# Altium footprint library FootPrintLib_1.PcbLib: 498 footprints (part 21 of 35)
Each footprint in its own frame and in the unit in brackets; x right, y up, seen from the top. Pads: shape width x height; smd on the part's side, far side on the other; paste and mask are expansions set on the pad; w line width, h text height; cw(c..) or ccw(c..) is an arc to the next point about the centre after c.
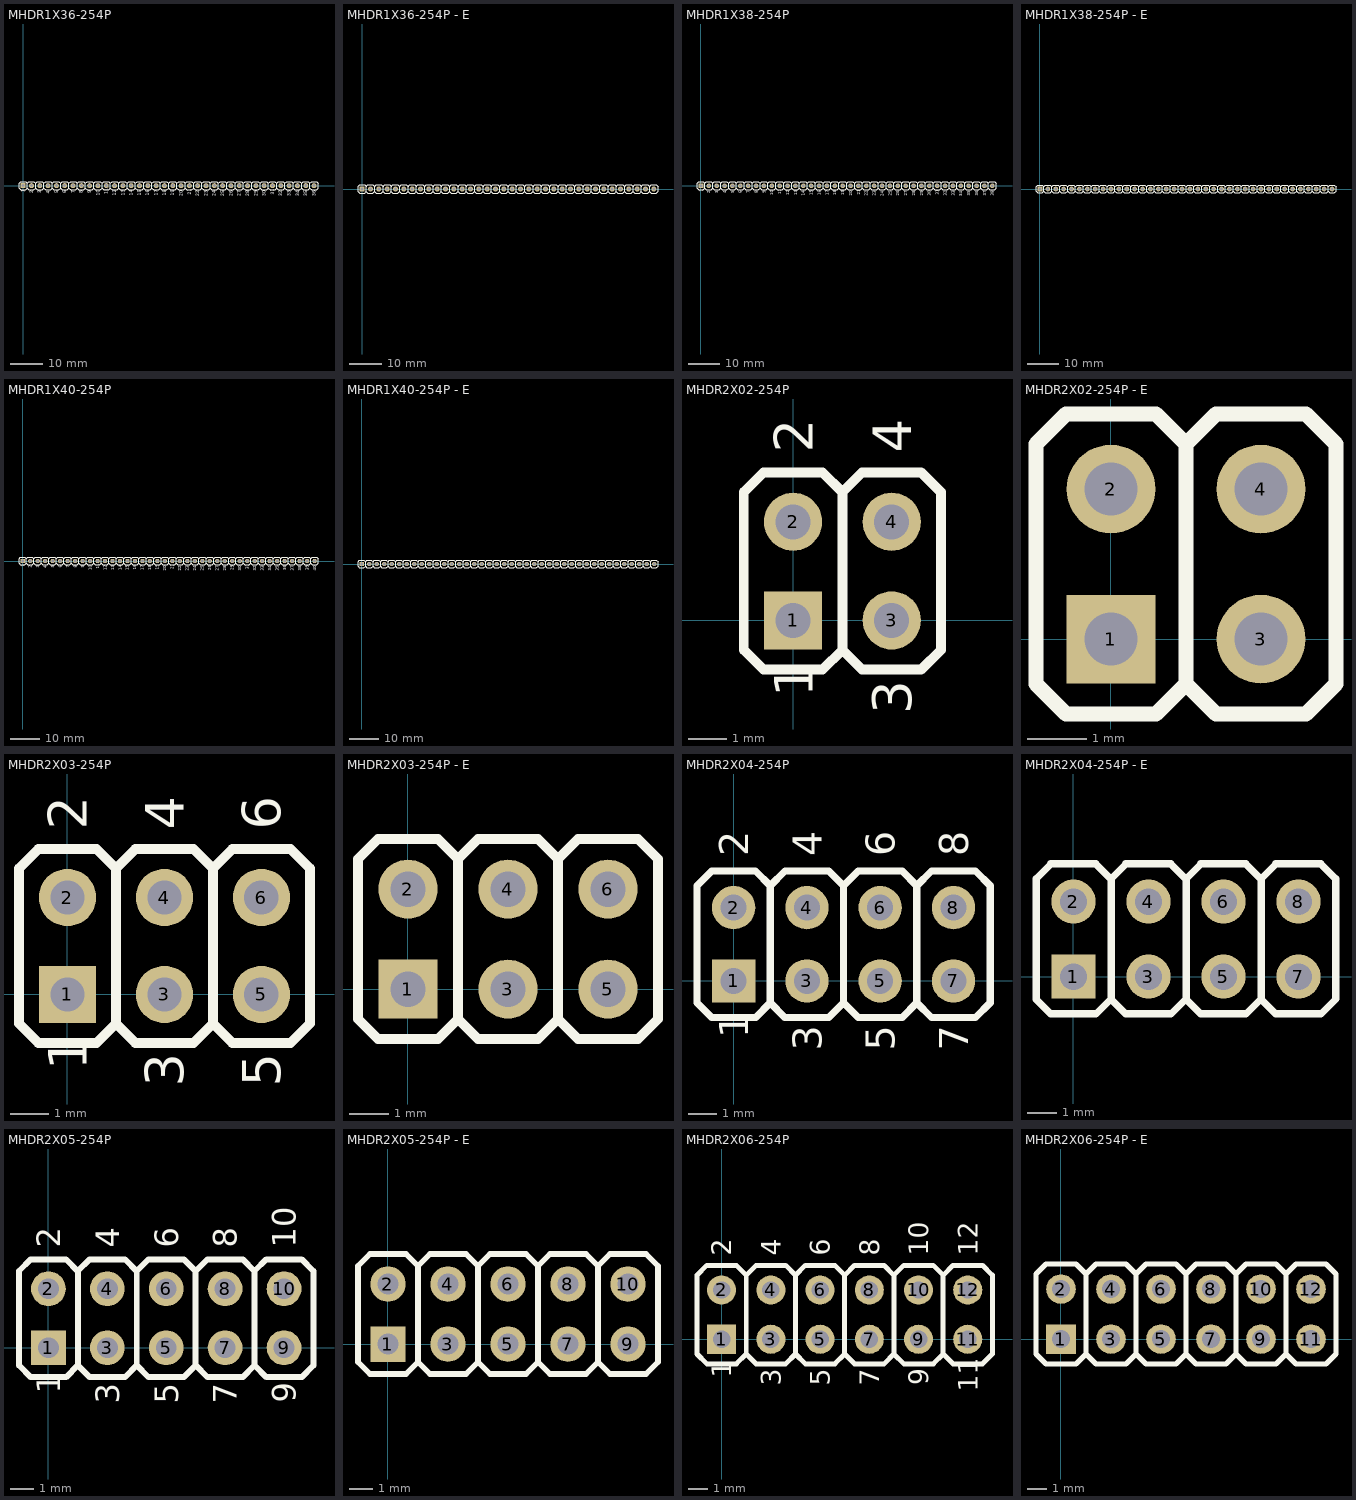
[diagram p20: the footprints below, top view; thin cyan lines are the x and y axes]

## MHDR1X36-254P [mm] "Male Header 1X36 with 2.54 mm Pitch"
pads (36):
  rect 1.5x1.5 hole 0.9: 1(0,0)
  round 1.5 hole 0.9: 2(2.54,0) 3(5.08,0) 4(7.62,0) 5(10.16,0) 6(12.7,0) 7(15.24,0) 8(17.78,0) 9(20.32,0) 10(22.86,0) 11(25.4,0) 12(27.94,0) 13(30.48,0) 14(33.02,0) 15(35.56,0) 16(38.1,0) 17(40.64,0) 18(43.18,0) 19(45.72,0) 20(48.26,0) 21(50.8,0) 22(53.34,0) 23(55.88,0) 24(58.42,0) 25(60.96,0) 26(63.5,0) 27(66.04,0) 28(68.58,0) 29(71.12,0) 30(73.66,0) 31(76.2,0) 32(78.74,0) 33(81.28,0) 34(83.82,0) 35(86.36,0) 36(88.9,0)
Top Overlay:
  drawing of 253 lines, arcs and shapes, not listed
  text "36" at 89.408,-3.207 h1
  text "35" at 86.868,-3.254 h1
  text "34" at 84.328,-3.302 h1
  text "33" at 81.788,-3.254 h1
  text "32" at 79.248,-3.254 h1
  text "31" at 76.708,-2.826 h1
  text "30" at 74.168,-3.254 h1
  text "29" at 71.628,-3.207 h1
  text "28" at 69.088,-3.254 h1
  text "27" at 66.548,-3.254 h1
  text "26" at 64.008,-3.207 h1
  text "25" at 61.468,-3.254 h1
  text "24" at 58.928,-3.302 h1
  text "23" at 56.388,-3.254 h1
  text "22" at 53.848,-3.254 h1
  text "21" at 51.308,-2.826 h1
  text "20" at 48.768,-3.254 h1
  text "19" at 46.228,-3.05 h1
  text "18" at 43.688,-3.097 h1
  text "17" at 41.148,-3.097 h1
  text "16" at 38.608,-3.05 h1
  text "15" at 36.068,-3.097 h1
  text "14" at 33.528,-3.145 h1
  text "13" at 30.988,-3.097 h1
  text "12" at 28.448,-3.097 h1
  text "11" at 25.908,-2.669 h1
  text "10" at 23.368,-3.097 h1
  text "9" at 20.828,-2.317 h1
  text "8" at 18.288,-2.364 h1
  text "7" at 15.748,-2.364 h1
  text "6" at 13.208,-2.317 h1
  text "5" at 10.668,-2.364 h1
  text "4" at 8.128,-2.412 h1
  text "3" at 5.588,-2.364 h1
  text "2" at 3.048,-2.364 h1
  text "1" at 0.508,-1.936 h1
  text "1" at 0.508,-1.936 h1
3D body "PIN.STEP": height 8.43, standoff -2.49, extent -1.27,-1.27 1.27,1.27
3D body "PIN_mid.STEP": height 8.43, standoff -2.49, extent 1.27,-1.27 3.81,1.27
3D body "PIN_mid.STEP": height 8.43, standoff -2.49, extent 3.81,-1.27 6.35,1.27
3D body "PIN_mid.STEP": height 8.43, standoff -2.49, extent 6.35,-1.27 8.89,1.27
3D body "PIN_mid.STEP": height 8.43, standoff -2.49, extent 8.89,-1.27 11.43,1.27
3D body "PIN_mid.STEP": height 8.43, standoff -2.49, extent 11.43,-1.27 13.97,1.27
3D body "PIN_mid.STEP": height 8.43, standoff -2.49, extent 13.97,-1.27 16.51,1.27
3D body "PIN_mid.STEP": height 8.43, standoff -2.49, extent 16.51,-1.27 19.05,1.27
3D body "PIN_mid.STEP": height 8.43, standoff -2.49, extent 19.05,-1.27 21.59,1.27
3D body "PIN_mid.STEP": height 8.43, standoff -2.49, extent 21.59,-1.27 24.13,1.27
3D body "PIN_mid.STEP": height 8.43, standoff -2.49, extent 24.13,-1.27 26.67,1.27
3D body "PIN_mid.STEP": height 8.43, standoff -2.49, extent 26.67,-1.27 29.21,1.27
3D body "PIN_mid.STEP": height 8.43, standoff -2.49, extent 29.21,-1.27 31.75,1.27
3D body "PIN_mid.STEP": height 8.43, standoff -2.49, extent 31.75,-1.27 34.29,1.27
3D body "PIN_mid.STEP": height 8.43, standoff -2.49, extent 34.29,-1.27 36.83,1.27
3D body "PIN_mid.STEP": height 8.43, standoff -2.49, extent 36.83,-1.27 39.37,1.27
3D body "PIN_mid.STEP": height 8.43, standoff -2.49, extent 39.37,-1.27 41.91,1.27
3D body "PIN_mid.STEP": height 8.43, standoff -2.49, extent 41.91,-1.27 44.45,1.27
3D body "PIN_mid.STEP": height 8.43, standoff -2.49, extent 44.45,-1.27 46.99,1.27
3D body "PIN_mid.STEP": height 8.43, standoff -2.49, extent 46.99,-1.27 49.53,1.27
3D body "PIN_mid.STEP": height 8.43, standoff -2.49, extent 49.53,-1.27 52.07,1.27
3D body "PIN_mid.STEP": height 8.43, standoff -2.49, extent 52.07,-1.27 54.61,1.27
3D body "PIN_mid.STEP": height 8.43, standoff -2.49, extent 54.61,-1.27 57.15,1.27
3D body "PIN_mid.STEP": height 8.43, standoff -2.49, extent 57.15,-1.27 59.69,1.27
3D body "PIN_mid.STEP": height 8.43, standoff -2.49, extent 59.69,-1.27 62.23,1.27
3D body "PIN_mid.STEP": height 8.43, standoff -2.49, extent 62.23,-1.27 64.77,1.27
3D body "PIN_mid.STEP": height 8.43, standoff -2.49, extent 64.77,-1.27 67.31,1.27
3D body "PIN_mid.STEP": height 8.43, standoff -2.49, extent 67.31,-1.27 69.85,1.27
3D body "PIN_mid.STEP": height 8.43, standoff -2.49, extent 69.85,-1.27 72.39,1.27
3D body "PIN_mid.STEP": height 8.43, standoff -2.49, extent 72.39,-1.27 74.93,1.27
3D body "PIN_mid.STEP": height 8.43, standoff -2.49, extent 74.93,-1.27 77.47,1.27
3D body "PIN_mid.STEP": height 8.43, standoff -2.49, extent 77.47,-1.27 80.01,1.27
3D body "PIN_mid.STEP": height 8.43, standoff -2.49, extent 80.01,-1.27 82.55,1.27
3D body "PIN_mid.STEP": height 8.43, standoff -2.49, extent 82.55,-1.27 85.09,1.27
3D body "PIN_mid.STEP": height 8.43, standoff -2.49, extent 85.09,-1.27 87.63,1.27
3D body "PIN.STEP": height 8.43, standoff -2.49, extent 87.63,-1.27 90.17,1.27

## MHDR1X36-254P - E [mm] "Male Header 1X36 with 2.54 mm Pitch"
pads (36):
  rect 1.5x1.5 hole 0.9: 1(0,0)
  round 1.5 hole 0.9: 2(2.54,0) 3(5.08,0) 4(7.62,0) 5(10.16,0) 6(12.7,0) 7(15.24,0) 8(17.78,0) 9(20.32,0) 10(22.86,0) 11(25.4,0) 12(27.94,0) 13(30.48,0) 14(33.02,0) 15(35.56,0) 16(38.1,0) 17(40.64,0) 18(43.18,0) 19(45.72,0) 20(48.26,0) 21(50.8,0) 22(53.34,0) 23(55.88,0) 24(58.42,0) 25(60.96,0) 26(63.5,0) 27(66.04,0) 28(68.58,0) 29(71.12,0) 30(73.66,0) 31(76.2,0) 32(78.74,0) 33(81.28,0) 34(83.82,0) 35(86.36,0) 36(88.9,0)
Top Overlay:
  drawing of 253 lines, arcs and shapes, not listed
3D body "PIN.STEP": height 8.43, standoff -2.49, extent 87.63,-1.27 90.17,1.27
3D body "PIN_mid.STEP": height 8.43, standoff -2.49, extent 85.09,-1.27 87.63,1.27
3D body "PIN_mid.STEP": height 8.43, standoff -2.49, extent 82.55,-1.27 85.09,1.27
3D body "PIN_mid.STEP": height 8.43, standoff -2.49, extent 80.01,-1.27 82.55,1.27
3D body "PIN_mid.STEP": height 8.43, standoff -2.49, extent 77.47,-1.27 80.01,1.27
3D body "PIN_mid.STEP": height 8.43, standoff -2.49, extent 74.93,-1.27 77.47,1.27
3D body "PIN_mid.STEP": height 8.43, standoff -2.49, extent 72.39,-1.27 74.93,1.27
3D body "PIN_mid.STEP": height 8.43, standoff -2.49, extent 69.85,-1.27 72.39,1.27
3D body "PIN_mid.STEP": height 8.43, standoff -2.49, extent 67.31,-1.27 69.85,1.27
3D body "PIN_mid.STEP": height 8.43, standoff -2.49, extent 64.77,-1.27 67.31,1.27
3D body "PIN_mid.STEP": height 8.43, standoff -2.49, extent 62.23,-1.27 64.77,1.27
3D body "PIN_mid.STEP": height 8.43, standoff -2.49, extent 59.69,-1.27 62.23,1.27
3D body "PIN_mid.STEP": height 8.43, standoff -2.49, extent 57.15,-1.27 59.69,1.27
3D body "PIN_mid.STEP": height 8.43, standoff -2.49, extent 54.61,-1.27 57.15,1.27
3D body "PIN_mid.STEP": height 8.43, standoff -2.49, extent 52.07,-1.27 54.61,1.27
3D body "PIN_mid.STEP": height 8.43, standoff -2.49, extent 49.53,-1.27 52.07,1.27
3D body "PIN_mid.STEP": height 8.43, standoff -2.49, extent 46.99,-1.27 49.53,1.27
3D body "PIN_mid.STEP": height 8.43, standoff -2.49, extent 44.45,-1.27 46.99,1.27
3D body "PIN_mid.STEP": height 8.43, standoff -2.49, extent 41.91,-1.27 44.45,1.27
3D body "PIN_mid.STEP": height 8.43, standoff -2.49, extent 39.37,-1.27 41.91,1.27
3D body "PIN_mid.STEP": height 8.43, standoff -2.49, extent 36.83,-1.27 39.37,1.27
3D body "PIN_mid.STEP": height 8.43, standoff -2.49, extent 34.29,-1.27 36.83,1.27
3D body "PIN_mid.STEP": height 8.43, standoff -2.49, extent 31.75,-1.27 34.29,1.27
3D body "PIN_mid.STEP": height 8.43, standoff -2.49, extent 29.21,-1.27 31.75,1.27
3D body "PIN_mid.STEP": height 8.43, standoff -2.49, extent 26.67,-1.27 29.21,1.27
3D body "PIN_mid.STEP": height 8.43, standoff -2.49, extent 24.13,-1.27 26.67,1.27
3D body "PIN_mid.STEP": height 8.43, standoff -2.49, extent 21.59,-1.27 24.13,1.27
3D body "PIN_mid.STEP": height 8.43, standoff -2.49, extent 19.05,-1.27 21.59,1.27
3D body "PIN_mid.STEP": height 8.43, standoff -2.49, extent 16.51,-1.27 19.05,1.27
3D body "PIN_mid.STEP": height 8.43, standoff -2.49, extent 13.97,-1.27 16.51,1.27
3D body "PIN_mid.STEP": height 8.43, standoff -2.49, extent 11.43,-1.27 13.97,1.27
3D body "PIN_mid.STEP": height 8.43, standoff -2.49, extent 8.89,-1.27 11.43,1.27
3D body "PIN_mid.STEP": height 8.43, standoff -2.49, extent 6.35,-1.27 8.89,1.27
3D body "PIN_mid.STEP": height 8.43, standoff -2.49, extent 3.81,-1.27 6.35,1.27
3D body "PIN_mid.STEP": height 8.43, standoff -2.49, extent 1.27,-1.27 3.81,1.27
3D body "PIN.STEP": height 8.43, standoff -2.49, extent -1.27,-1.27 1.27,1.27

## MHDR1X38-254P [mm] "Male Header 1X38 with 2.54 mm Pitch"
pads (38):
  rect 1.5x1.5 hole 0.9: 1(0,0)
  round 1.5 hole 0.9: 2(2.54,0) 3(5.08,0) 4(7.62,0) 5(10.16,0) 6(12.7,0) 7(15.24,0) 8(17.78,0) 9(20.32,0) 10(22.86,0) 11(25.4,0) 12(27.94,0) 13(30.48,0) 14(33.02,0) 15(35.56,0) 16(38.1,0) 17(40.64,0) 18(43.18,0) 19(45.72,0) 20(48.26,0) 21(50.8,0) 22(53.34,0) 23(55.88,0) 24(58.42,0) 25(60.96,0) 26(63.5,0) 27(66.04,0) 28(68.58,0) 29(71.12,0) 30(73.66,0) 31(76.2,0) 32(78.74,0) 33(81.28,0) 34(83.82,0) 35(86.36,0) 36(88.9,0) 37(91.44,0) 38(93.98,0)
Top Overlay:
  drawing of 267 lines, arcs and shapes, not listed
  text "38" at 94.488,-3.254 h1
  text "37" at 91.948,-3.254 h1
  text "36" at 89.408,-3.207 h1
  text "35" at 86.868,-3.254 h1
  text "34" at 84.328,-3.302 h1
  text "33" at 81.788,-3.254 h1
  text "32" at 79.248,-3.254 h1
  text "31" at 76.708,-2.826 h1
  text "30" at 74.168,-3.254 h1
  text "29" at 71.628,-3.207 h1
  text "28" at 69.088,-3.254 h1
  text "27" at 66.548,-3.254 h1
  text "26" at 64.008,-3.207 h1
  text "25" at 61.468,-3.254 h1
  text "24" at 58.928,-3.302 h1
  text "23" at 56.388,-3.254 h1
  text "22" at 53.848,-3.254 h1
  text "21" at 51.308,-2.826 h1
  text "20" at 48.768,-3.254 h1
  text "19" at 46.228,-3.05 h1
  text "18" at 43.688,-3.097 h1
  text "17" at 41.148,-3.097 h1
  text "16" at 38.608,-3.05 h1
  text "15" at 36.068,-3.097 h1
  text "14" at 33.528,-3.145 h1
  text "13" at 30.988,-3.097 h1
  text "12" at 28.448,-3.097 h1
  text "11" at 25.908,-2.669 h1
  text "10" at 23.368,-3.097 h1
  text "9" at 20.828,-2.317 h1
  text "8" at 18.288,-2.364 h1
  text "7" at 15.748,-2.364 h1
  text "6" at 13.208,-2.317 h1
  text "5" at 10.668,-2.364 h1
  text "4" at 8.128,-2.412 h1
  text "3" at 5.588,-2.364 h1
  text "2" at 3.048,-2.364 h1
  text "1" at 0.508,-1.936 h1
  text "1" at 0.508,-1.936 h1
3D body "PIN.STEP": height 8.43, standoff -2.49, extent 92.71,-1.27 95.25,1.27
3D body "PIN_mid.STEP": height 8.43, standoff -2.49, extent 90.17,-1.27 92.71,1.27
3D body "PIN_mid.STEP": height 8.43, standoff -2.49, extent 87.63,-1.27 90.17,1.27
3D body "PIN_mid.STEP": height 8.43, standoff -2.49, extent 85.09,-1.27 87.63,1.27
3D body "PIN_mid.STEP": height 8.43, standoff -2.49, extent 82.55,-1.27 85.09,1.27
3D body "PIN_mid.STEP": height 8.43, standoff -2.49, extent 80.01,-1.27 82.55,1.27
3D body "PIN_mid.STEP": height 8.43, standoff -2.49, extent 77.47,-1.27 80.01,1.27
3D body "PIN_mid.STEP": height 8.43, standoff -2.49, extent 74.93,-1.27 77.47,1.27
3D body "PIN_mid.STEP": height 8.43, standoff -2.49, extent 72.39,-1.27 74.93,1.27
3D body "PIN_mid.STEP": height 8.43, standoff -2.49, extent 69.85,-1.27 72.39,1.27
3D body "PIN_mid.STEP": height 8.43, standoff -2.49, extent 67.31,-1.27 69.85,1.27
3D body "PIN_mid.STEP": height 8.43, standoff -2.49, extent 64.77,-1.27 67.31,1.27
3D body "PIN_mid.STEP": height 8.43, standoff -2.49, extent 62.23,-1.27 64.77,1.27
3D body "PIN_mid.STEP": height 8.43, standoff -2.49, extent 59.69,-1.27 62.23,1.27
3D body "PIN_mid.STEP": height 8.43, standoff -2.49, extent 57.15,-1.27 59.69,1.27
3D body "PIN_mid.STEP": height 8.43, standoff -2.49, extent 54.61,-1.27 57.15,1.27
3D body "PIN_mid.STEP": height 8.43, standoff -2.49, extent 52.07,-1.27 54.61,1.27
3D body "PIN_mid.STEP": height 8.43, standoff -2.49, extent 49.53,-1.27 52.07,1.27
3D body "PIN_mid.STEP": height 8.43, standoff -2.49, extent 46.99,-1.27 49.53,1.27
3D body "PIN_mid.STEP": height 8.43, standoff -2.49, extent 44.45,-1.27 46.99,1.27
3D body "PIN_mid.STEP": height 8.43, standoff -2.49, extent 41.91,-1.27 44.45,1.27
3D body "PIN_mid.STEP": height 8.43, standoff -2.49, extent 39.37,-1.27 41.91,1.27
3D body "PIN_mid.STEP": height 8.43, standoff -2.49, extent 36.83,-1.27 39.37,1.27
3D body "PIN_mid.STEP": height 8.43, standoff -2.49, extent 34.29,-1.27 36.83,1.27
3D body "PIN_mid.STEP": height 8.43, standoff -2.49, extent 31.75,-1.27 34.29,1.27
3D body "PIN_mid.STEP": height 8.43, standoff -2.49, extent 29.21,-1.27 31.75,1.27
3D body "PIN_mid.STEP": height 8.43, standoff -2.49, extent 26.67,-1.27 29.21,1.27
3D body "PIN_mid.STEP": height 8.43, standoff -2.49, extent 24.13,-1.27 26.67,1.27
3D body "PIN_mid.STEP": height 8.43, standoff -2.49, extent 21.59,-1.27 24.13,1.27
3D body "PIN_mid.STEP": height 8.43, standoff -2.49, extent 19.05,-1.27 21.59,1.27
3D body "PIN_mid.STEP": height 8.43, standoff -2.49, extent 16.51,-1.27 19.05,1.27
3D body "PIN_mid.STEP": height 8.43, standoff -2.49, extent 13.97,-1.27 16.51,1.27
3D body "PIN_mid.STEP": height 8.43, standoff -2.49, extent 11.43,-1.27 13.97,1.27
3D body "PIN_mid.STEP": height 8.43, standoff -2.49, extent 8.89,-1.27 11.43,1.27
3D body "PIN_mid.STEP": height 8.43, standoff -2.49, extent 6.35,-1.27 8.89,1.27
3D body "PIN_mid.STEP": height 8.43, standoff -2.49, extent 3.81,-1.27 6.35,1.27
3D body "PIN_mid.STEP": height 8.43, standoff -2.49, extent 1.27,-1.27 3.81,1.27
3D body "PIN.STEP": height 8.43, standoff -2.49, extent -1.27,-1.27 1.27,1.27

## MHDR1X38-254P - E [mm] "Male Header 1X38 with 2.54 mm Pitch"
pads (38):
  rect 1.5x1.5 hole 0.9: 1(0,0)
  round 1.5 hole 0.9: 2(2.54,0) 3(5.08,0) 4(7.62,0) 5(10.16,0) 6(12.7,0) 7(15.24,0) 8(17.78,0) 9(20.32,0) 10(22.86,0) 11(25.4,0) 12(27.94,0) 13(30.48,0) 14(33.02,0) 15(35.56,0) 16(38.1,0) 17(40.64,0) 18(43.18,0) 19(45.72,0) 20(48.26,0) 21(50.8,0) 22(53.34,0) 23(55.88,0) 24(58.42,0) 25(60.96,0) 26(63.5,0) 27(66.04,0) 28(68.58,0) 29(71.12,0) 30(73.66,0) 31(76.2,0) 32(78.74,0) 33(81.28,0) 34(83.82,0) 35(86.36,0) 36(88.9,0) 37(91.44,0) 38(93.98,0)
Top Overlay:
  drawing of 267 lines, arcs and shapes, not listed
3D body "PIN.STEP": height 8.43, standoff -2.49, extent -1.27,-1.27 1.27,1.27
3D body "PIN_mid.STEP": height 8.43, standoff -2.49, extent 1.27,-1.27 3.81,1.27
3D body "PIN_mid.STEP": height 8.43, standoff -2.49, extent 3.81,-1.27 6.35,1.27
3D body "PIN_mid.STEP": height 8.43, standoff -2.49, extent 6.35,-1.27 8.89,1.27
3D body "PIN_mid.STEP": height 8.43, standoff -2.49, extent 8.89,-1.27 11.43,1.27
3D body "PIN_mid.STEP": height 8.43, standoff -2.49, extent 11.43,-1.27 13.97,1.27
3D body "PIN_mid.STEP": height 8.43, standoff -2.49, extent 13.97,-1.27 16.51,1.27
3D body "PIN_mid.STEP": height 8.43, standoff -2.49, extent 16.51,-1.27 19.05,1.27
3D body "PIN_mid.STEP": height 8.43, standoff -2.49, extent 19.05,-1.27 21.59,1.27
3D body "PIN_mid.STEP": height 8.43, standoff -2.49, extent 21.59,-1.27 24.13,1.27
3D body "PIN_mid.STEP": height 8.43, standoff -2.49, extent 24.13,-1.27 26.67,1.27
3D body "PIN_mid.STEP": height 8.43, standoff -2.49, extent 26.67,-1.27 29.21,1.27
3D body "PIN_mid.STEP": height 8.43, standoff -2.49, extent 29.21,-1.27 31.75,1.27
3D body "PIN_mid.STEP": height 8.43, standoff -2.49, extent 31.75,-1.27 34.29,1.27
3D body "PIN_mid.STEP": height 8.43, standoff -2.49, extent 34.29,-1.27 36.83,1.27
3D body "PIN_mid.STEP": height 8.43, standoff -2.49, extent 36.83,-1.27 39.37,1.27
3D body "PIN_mid.STEP": height 8.43, standoff -2.49, extent 39.37,-1.27 41.91,1.27
3D body "PIN_mid.STEP": height 8.43, standoff -2.49, extent 41.91,-1.27 44.45,1.27
3D body "PIN_mid.STEP": height 8.43, standoff -2.49, extent 44.45,-1.27 46.99,1.27
3D body "PIN_mid.STEP": height 8.43, standoff -2.49, extent 46.99,-1.27 49.53,1.27
3D body "PIN_mid.STEP": height 8.43, standoff -2.49, extent 49.53,-1.27 52.07,1.27
3D body "PIN_mid.STEP": height 8.43, standoff -2.49, extent 52.07,-1.27 54.61,1.27
3D body "PIN_mid.STEP": height 8.43, standoff -2.49, extent 54.61,-1.27 57.15,1.27
3D body "PIN_mid.STEP": height 8.43, standoff -2.49, extent 57.15,-1.27 59.69,1.27
3D body "PIN_mid.STEP": height 8.43, standoff -2.49, extent 59.69,-1.27 62.23,1.27
3D body "PIN_mid.STEP": height 8.43, standoff -2.49, extent 62.23,-1.27 64.77,1.27
3D body "PIN_mid.STEP": height 8.43, standoff -2.49, extent 64.77,-1.27 67.31,1.27
3D body "PIN_mid.STEP": height 8.43, standoff -2.49, extent 67.31,-1.27 69.85,1.27
3D body "PIN_mid.STEP": height 8.43, standoff -2.49, extent 69.85,-1.27 72.39,1.27
3D body "PIN_mid.STEP": height 8.43, standoff -2.49, extent 72.39,-1.27 74.93,1.27
3D body "PIN_mid.STEP": height 8.43, standoff -2.49, extent 74.93,-1.27 77.47,1.27
3D body "PIN_mid.STEP": height 8.43, standoff -2.49, extent 77.47,-1.27 80.01,1.27
3D body "PIN_mid.STEP": height 8.43, standoff -2.49, extent 80.01,-1.27 82.55,1.27
3D body "PIN_mid.STEP": height 8.43, standoff -2.49, extent 82.55,-1.27 85.09,1.27
3D body "PIN_mid.STEP": height 8.43, standoff -2.49, extent 85.09,-1.27 87.63,1.27
3D body "PIN_mid.STEP": height 8.43, standoff -2.49, extent 87.63,-1.27 90.17,1.27
3D body "PIN_mid.STEP": height 8.43, standoff -2.49, extent 90.17,-1.27 92.71,1.27
3D body "PIN.STEP": height 8.43, standoff -2.49, extent 92.71,-1.27 95.25,1.27

## MHDR1X40-254P [mm] "Male Header 1X40 with 2.54 mm Pitch"
pads (40):
  rect 1.5x1.5 hole 0.9: 1(0,0)
  round 1.5 hole 0.9: 2(2.54,0) 3(5.08,0) 4(7.62,0) 5(10.16,0) 6(12.7,0) 7(15.24,0) 8(17.78,0) 9(20.32,0) 10(22.86,0) 11(25.4,0) 12(27.94,0) 13(30.48,0) 14(33.02,0) 15(35.56,0) 16(38.1,0) 17(40.64,0) 18(43.18,0) 19(45.72,0) 20(48.26,0) 21(50.8,0) 22(53.34,0) 23(55.88,0) 24(58.42,0) 25(60.96,0) 26(63.5,0) 27(66.04,0) 28(68.58,0) 29(71.12,0) 30(73.66,0) 31(76.2,0) 32(78.74,0) 33(81.28,0) 34(83.82,0) 35(86.36,0) 36(88.9,0) 37(91.44,0) 38(93.98,0) 39(96.52,0) 40(99.06,0)
Top Overlay:
  drawing of 281 lines, arcs and shapes, not listed
  text "40" at 99.568,-3.254 h1
  text "39" at 97.028,-3.207 h1
  text "38" at 94.488,-3.254 h1
  text "37" at 91.948,-3.254 h1
  text "36" at 89.408,-3.207 h1
  text "35" at 86.868,-3.254 h1
  text "34" at 84.328,-3.302 h1
  text "33" at 81.788,-3.254 h1
  text "32" at 79.248,-3.254 h1
  text "31" at 76.708,-2.826 h1
  text "30" at 74.168,-3.254 h1
  text "29" at 71.628,-3.207 h1
  text "28" at 69.088,-3.254 h1
  text "27" at 66.548,-3.254 h1
  text "26" at 64.008,-3.207 h1
  text "25" at 61.468,-3.254 h1
  text "24" at 58.928,-3.302 h1
  text "23" at 56.388,-3.254 h1
  text "22" at 53.848,-3.254 h1
  text "21" at 51.308,-2.826 h1
  text "20" at 48.768,-3.254 h1
  text "19" at 46.228,-3.05 h1
  text "18" at 43.688,-3.097 h1
  text "17" at 41.148,-3.097 h1
  text "16" at 38.608,-3.05 h1
  text "15" at 36.068,-3.097 h1
  text "14" at 33.528,-3.145 h1
  text "13" at 30.988,-3.097 h1
  text "12" at 28.448,-3.097 h1
  text "11" at 25.908,-2.669 h1
  text "10" at 23.368,-3.097 h1
  text "9" at 20.828,-2.317 h1
  text "8" at 18.288,-2.364 h1
  text "7" at 15.748,-2.364 h1
  text "6" at 13.208,-2.317 h1
  text "5" at 10.668,-2.364 h1
  text "4" at 8.128,-2.412 h1
  text "3" at 5.588,-2.364 h1
  text "2" at 3.048,-2.364 h1
  text "1" at 0.508,-1.936 h1
  text "1" at 0.508,-1.936 h1
3D body "PIN.STEP": height 8.43, standoff -2.49, extent -1.27,-1.27 1.27,1.27
3D body "PIN_mid.STEP": height 8.43, standoff -2.49, extent 1.27,-1.27 3.81,1.27
3D body "PIN_mid.STEP": height 8.43, standoff -2.49, extent 3.81,-1.27 6.35,1.27
3D body "PIN_mid.STEP": height 8.43, standoff -2.49, extent 6.35,-1.27 8.89,1.27
3D body "PIN_mid.STEP": height 8.43, standoff -2.49, extent 8.89,-1.27 11.43,1.27
3D body "PIN_mid.STEP": height 8.43, standoff -2.49, extent 11.43,-1.27 13.97,1.27
3D body "PIN_mid.STEP": height 8.43, standoff -2.49, extent 13.97,-1.27 16.51,1.27
3D body "PIN_mid.STEP": height 8.43, standoff -2.49, extent 16.51,-1.27 19.05,1.27
3D body "PIN_mid.STEP": height 8.43, standoff -2.49, extent 19.05,-1.27 21.59,1.27
3D body "PIN_mid.STEP": height 8.43, standoff -2.49, extent 21.59,-1.27 24.13,1.27
3D body "PIN_mid.STEP": height 8.43, standoff -2.49, extent 24.13,-1.27 26.67,1.27
3D body "PIN_mid.STEP": height 8.43, standoff -2.49, extent 26.67,-1.27 29.21,1.27
3D body "PIN_mid.STEP": height 8.43, standoff -2.49, extent 29.21,-1.27 31.75,1.27
3D body "PIN_mid.STEP": height 8.43, standoff -2.49, extent 31.75,-1.27 34.29,1.27
3D body "PIN_mid.STEP": height 8.43, standoff -2.49, extent 34.29,-1.27 36.83,1.27
3D body "PIN_mid.STEP": height 8.43, standoff -2.49, extent 36.83,-1.27 39.37,1.27
3D body "PIN_mid.STEP": height 8.43, standoff -2.49, extent 39.37,-1.27 41.91,1.27
3D body "PIN_mid.STEP": height 8.43, standoff -2.49, extent 41.91,-1.27 44.45,1.27
3D body "PIN_mid.STEP": height 8.43, standoff -2.49, extent 44.45,-1.27 46.99,1.27
3D body "PIN_mid.STEP": height 8.43, standoff -2.49, extent 46.99,-1.27 49.53,1.27
3D body "PIN_mid.STEP": height 8.43, standoff -2.49, extent 49.53,-1.27 52.07,1.27
3D body "PIN_mid.STEP": height 8.43, standoff -2.49, extent 52.07,-1.27 54.61,1.27
3D body "PIN_mid.STEP": height 8.43, standoff -2.49, extent 54.61,-1.27 57.15,1.27
3D body "PIN_mid.STEP": height 8.43, standoff -2.49, extent 57.15,-1.27 59.69,1.27
3D body "PIN_mid.STEP": height 8.43, standoff -2.49, extent 59.69,-1.27 62.23,1.27
3D body "PIN_mid.STEP": height 8.43, standoff -2.49, extent 62.23,-1.27 64.77,1.27
3D body "PIN_mid.STEP": height 8.43, standoff -2.49, extent 64.77,-1.27 67.31,1.27
3D body "PIN_mid.STEP": height 8.43, standoff -2.49, extent 67.31,-1.27 69.85,1.27
3D body "PIN_mid.STEP": height 8.43, standoff -2.49, extent 69.85,-1.27 72.39,1.27
3D body "PIN_mid.STEP": height 8.43, standoff -2.49, extent 72.39,-1.27 74.93,1.27
3D body "PIN_mid.STEP": height 8.43, standoff -2.49, extent 74.93,-1.27 77.47,1.27
3D body "PIN_mid.STEP": height 8.43, standoff -2.49, extent 77.47,-1.27 80.01,1.27
3D body "PIN_mid.STEP": height 8.43, standoff -2.49, extent 80.01,-1.27 82.55,1.27
3D body "PIN_mid.STEP": height 8.43, standoff -2.49, extent 82.55,-1.27 85.09,1.27
3D body "PIN_mid.STEP": height 8.43, standoff -2.49, extent 85.09,-1.27 87.63,1.27
3D body "PIN_mid.STEP": height 8.43, standoff -2.49, extent 87.63,-1.27 90.17,1.27
3D body "PIN_mid.STEP": height 8.43, standoff -2.49, extent 90.17,-1.27 92.71,1.27
3D body "PIN_mid.STEP": height 8.43, standoff -2.49, extent 92.71,-1.27 95.25,1.27
3D body "PIN_mid.STEP": height 8.43, standoff -2.49, extent 95.25,-1.27 97.79,1.27
3D body "PIN.STEP": height 8.43, standoff -2.49, extent 97.79,-1.27 100.33,1.27

## MHDR1X40-254P - E [mm] "Male Header 1X40 with 2.54 mm Pitch"
pads (40):
  rect 1.5x1.5 hole 0.9: 1(0,0)
  round 1.5 hole 0.9: 2(2.54,0) 3(5.08,0) 4(7.62,0) 5(10.16,0) 6(12.7,0) 7(15.24,0) 8(17.78,0) 9(20.32,0) 10(22.86,0) 11(25.4,0) 12(27.94,0) 13(30.48,0) 14(33.02,0) 15(35.56,0) 16(38.1,0) 17(40.64,0) 18(43.18,0) 19(45.72,0) 20(48.26,0) 21(50.8,0) 22(53.34,0) 23(55.88,0) 24(58.42,0) 25(60.96,0) 26(63.5,0) 27(66.04,0) 28(68.58,0) 29(71.12,0) 30(73.66,0) 31(76.2,0) 32(78.74,0) 33(81.28,0) 34(83.82,0) 35(86.36,0) 36(88.9,0) 37(91.44,0) 38(93.98,0) 39(96.52,0) 40(99.06,0)
Top Overlay:
  drawing of 281 lines, arcs and shapes, not listed
3D body "PIN.STEP": height 8.43, standoff -2.49, extent -1.27,-1.27 1.27,1.27
3D body "PIN_mid.STEP": height 8.43, standoff -2.49, extent 1.27,-1.27 3.81,1.27
3D body "PIN_mid.STEP": height 8.43, standoff -2.49, extent 3.81,-1.27 6.35,1.27
3D body "PIN_mid.STEP": height 8.43, standoff -2.49, extent 6.35,-1.27 8.89,1.27
3D body "PIN_mid.STEP": height 8.43, standoff -2.49, extent 8.89,-1.27 11.43,1.27
3D body "PIN_mid.STEP": height 8.43, standoff -2.49, extent 11.43,-1.27 13.97,1.27
3D body "PIN_mid.STEP": height 8.43, standoff -2.49, extent 13.97,-1.27 16.51,1.27
3D body "PIN_mid.STEP": height 8.43, standoff -2.49, extent 16.51,-1.27 19.05,1.27
3D body "PIN_mid.STEP": height 8.43, standoff -2.49, extent 19.05,-1.27 21.59,1.27
3D body "PIN_mid.STEP": height 8.43, standoff -2.49, extent 21.59,-1.27 24.13,1.27
3D body "PIN_mid.STEP": height 8.43, standoff -2.49, extent 24.13,-1.27 26.67,1.27
3D body "PIN_mid.STEP": height 8.43, standoff -2.49, extent 26.67,-1.27 29.21,1.27
3D body "PIN_mid.STEP": height 8.43, standoff -2.49, extent 29.21,-1.27 31.75,1.27
3D body "PIN_mid.STEP": height 8.43, standoff -2.49, extent 31.75,-1.27 34.29,1.27
3D body "PIN_mid.STEP": height 8.43, standoff -2.49, extent 34.29,-1.27 36.83,1.27
3D body "PIN_mid.STEP": height 8.43, standoff -2.49, extent 36.83,-1.27 39.37,1.27
3D body "PIN_mid.STEP": height 8.43, standoff -2.49, extent 39.37,-1.27 41.91,1.27
3D body "PIN_mid.STEP": height 8.43, standoff -2.49, extent 41.91,-1.27 44.45,1.27
3D body "PIN_mid.STEP": height 8.43, standoff -2.49, extent 44.45,-1.27 46.99,1.27
3D body "PIN_mid.STEP": height 8.43, standoff -2.49, extent 46.99,-1.27 49.53,1.27
3D body "PIN_mid.STEP": height 8.43, standoff -2.49, extent 49.53,-1.27 52.07,1.27
3D body "PIN_mid.STEP": height 8.43, standoff -2.49, extent 52.07,-1.27 54.61,1.27
3D body "PIN_mid.STEP": height 8.43, standoff -2.49, extent 54.61,-1.27 57.15,1.27
3D body "PIN_mid.STEP": height 8.43, standoff -2.49, extent 57.15,-1.27 59.69,1.27
3D body "PIN_mid.STEP": height 8.43, standoff -2.49, extent 59.69,-1.27 62.23,1.27
3D body "PIN_mid.STEP": height 8.43, standoff -2.49, extent 62.23,-1.27 64.77,1.27
3D body "PIN_mid.STEP": height 8.43, standoff -2.49, extent 64.77,-1.27 67.31,1.27
3D body "PIN_mid.STEP": height 8.43, standoff -2.49, extent 67.31,-1.27 69.85,1.27
3D body "PIN_mid.STEP": height 8.43, standoff -2.49, extent 69.85,-1.27 72.39,1.27
3D body "PIN_mid.STEP": height 8.43, standoff -2.49, extent 72.39,-1.27 74.93,1.27
3D body "PIN_mid.STEP": height 8.43, standoff -2.49, extent 74.93,-1.27 77.47,1.27
3D body "PIN_mid.STEP": height 8.43, standoff -2.49, extent 77.47,-1.27 80.01,1.27
3D body "PIN_mid.STEP": height 8.43, standoff -2.49, extent 80.01,-1.27 82.55,1.27
3D body "PIN_mid.STEP": height 8.43, standoff -2.49, extent 82.55,-1.27 85.09,1.27
3D body "PIN_mid.STEP": height 8.43, standoff -2.49, extent 85.09,-1.27 87.63,1.27
3D body "PIN_mid.STEP": height 8.43, standoff -2.49, extent 87.63,-1.27 90.17,1.27
3D body "PIN_mid.STEP": height 8.43, standoff -2.49, extent 90.17,-1.27 92.71,1.27
3D body "PIN_mid.STEP": height 8.43, standoff -2.49, extent 92.71,-1.27 95.25,1.27
3D body "PIN_mid.STEP": height 8.43, standoff -2.49, extent 95.25,-1.27 97.79,1.27
3D body "PIN.STEP": height 8.43, standoff -2.49, extent 97.79,-1.27 100.33,1.27

## MHDR2X02-254P [mm] "Male Header 2X02 with 2.54 mm Pitch"
pads (4):
  rect 1.5x1.5 hole 0.9: 1(0,0)
  round 1.5 hole 0.9: 2(0,2.54) 3(2.54,0) 4(2.54,2.54)
Top Overlay:
  lines w0.254: 1.27,-0.762 1.777,-1.268 3.302,-1.268 3.81,-0.76 3.81,3.304 ; 1.27,3.302 0.761,3.812 -0.762,3.812 -1.27,3.304 -1.27,-0.762 -0.763,-1.268 0.762,-1.268 1.27,-0.76 1.27,3.304 1.778,3.812 3.301,3.812 3.81,3.302
  text "3" at 3.048,-2.412 h1
  text "4" at 3.048,4.318 h1
  text "2" at 0.508,4.318 h1
  text "1" at 0.508,-1.983 h1
3D body "PIN.STEP": height 8.43, standoff -2.49, extent 1.27,-1.27 3.81,1.27
3D body "PIN.STEP": height 8.43, standoff -2.49, extent 1.27,1.27 3.81,3.81
3D body "PIN.STEP": height 8.43, standoff -2.49, extent -1.27,1.27 1.27,3.81
3D body "PIN.STEP": height 8.43, standoff -2.49, extent -1.27,-1.27 1.27,1.27

## MHDR2X02-254P - E [mm] "Male Header 2X02 with 2.54 mm Pitch"
pads (4):
  rect 1.5x1.5 hole 0.9: 1(0,0)
  round 1.5 hole 0.9: 2(0,2.54) 3(2.54,0) 4(2.54,2.54)
Top Overlay:
  lines w0.254: 1.27,-0.762 1.777,-1.268 3.302,-1.268 3.81,-0.76 3.81,3.304 ; 1.27,3.302 0.761,3.812 -0.762,3.812 -1.27,3.304 -1.27,-0.762 -0.763,-1.268 0.762,-1.268 1.27,-0.76 1.27,3.304 1.778,3.812 3.301,3.812 3.81,3.302
3D body "PIN.STEP": height 8.43, standoff -2.49, extent 1.27,-1.27 3.81,1.27
3D body "PIN.STEP": height 8.43, standoff -2.49, extent 1.27,1.27 3.81,3.81
3D body "PIN.STEP": height 8.43, standoff -2.49, extent -1.27,1.27 1.27,3.81
3D body "PIN.STEP": height 8.43, standoff -2.49, extent -1.27,-1.27 1.27,1.27

## MHDR2X03-254P [mm] "Male Header 2X03 with 2.54 mm Pitch"
pads (6):
  rect 1.5x1.5 hole 0.9: 1(0,0)
  round 1.5 hole 0.9: 2(0,2.54) 3(2.54,0) 4(2.54,2.54) 5(5.08,0) 6(5.08,2.54)
Top Overlay:
  lines w0.254: 1.27,-0.762 1.777,-1.268 3.302,-1.268 3.81,-0.76 3.81,3.304 4.318,3.812 5.841,3.812 6.35,3.302 ; 1.27,3.302 0.761,3.812 -0.762,3.812 -1.27,3.304 -1.27,-0.762 -0.763,-1.268 0.762,-1.268 1.27,-0.76 1.27,3.304 1.778,3.812 3.301,3.812 3.81,3.302 ; 3.81,-0.762 4.317,-1.268 5.842,-1.268 6.35,-0.76 6.35,3.304
  text "5" at 5.588,-2.412 h1
  text "6" at 5.588,4.318 h1
  text "3" at 3.048,-2.412 h1
  text "4" at 3.048,4.318 h1
  text "2" at 0.508,4.318 h1
  text "1" at 0.508,-1.983 h1
3D body "PIN.STEP": height 8.43, standoff -2.49, extent 3.81,-1.27 6.35,1.27
3D body "PIN.STEP": height 8.43, standoff -2.49, extent 3.81,1.27 6.35,3.81
3D body "PIN.STEP": height 8.43, standoff -2.49, extent -1.27,1.27 1.27,3.81
3D body "PIN_mid.STEP": height 8.43, standoff -2.49, extent 1.27,-1.27 3.81,1.27
3D body "PIN_mid.STEP": height 8.43, standoff -2.49, extent 1.27,1.27 3.81,3.81
3D body "PIN.STEP": height 8.43, standoff -2.49, extent -1.27,-1.27 1.27,1.27

## MHDR2X03-254P - E [mm] "Male Header 2X03 with 2.54 mm Pitch"
pads (6):
  rect 1.5x1.5 hole 0.9: 1(0,0)
  round 1.5 hole 0.9: 2(0,2.54) 3(2.54,0) 4(2.54,2.54) 5(5.08,0) 6(5.08,2.54)
Top Overlay:
  lines w0.254: 1.27,-0.762 1.777,-1.268 3.302,-1.268 3.81,-0.76 3.81,3.304 4.318,3.812 5.841,3.812 6.35,3.302 ; 1.27,3.302 0.761,3.812 -0.762,3.812 -1.27,3.304 -1.27,-0.762 -0.763,-1.268 0.762,-1.268 1.27,-0.76 1.27,3.304 1.778,3.812 3.301,3.812 3.81,3.302 ; 3.81,-0.762 4.317,-1.268 5.842,-1.268 6.35,-0.76 6.35,3.304
3D body "PIN.STEP": height 8.43, standoff -2.49, extent -1.27,-1.27 1.27,1.27
3D body "PIN_mid.STEP": height 8.43, standoff -2.49, extent 1.27,1.27 3.81,3.81
3D body "PIN_mid.STEP": height 8.43, standoff -2.49, extent 1.27,-1.27 3.81,1.27
3D body "PIN.STEP": height 8.43, standoff -2.49, extent -1.27,1.27 1.27,3.81
3D body "PIN.STEP": height 8.43, standoff -2.49, extent 3.81,1.27 6.35,3.81
3D body "PIN.STEP": height 8.43, standoff -2.49, extent 3.81,-1.27 6.35,1.27

## MHDR2X04-254P [mm] "Male Header 2X04 with 2.54 mm Pitch"
pads (8):
  rect 1.5x1.5 hole 0.9: 1(0,0)
  round 1.5 hole 0.9: 2(0,2.54) 3(2.54,0) 4(2.54,2.54) 5(5.08,0) 6(5.08,2.54) 7(7.62,0) 8(7.62,2.54)
Top Overlay:
  lines w0.254: 1.27,-0.762 1.777,-1.268 3.302,-1.268 3.81,-0.76 3.81,3.304 4.318,3.812 5.841,3.812 6.35,3.302 ; 1.27,3.302 0.761,3.812 -0.762,3.812 -1.27,3.304 -1.27,-0.762 -0.763,-1.268 0.762,-1.268 1.27,-0.76 1.27,3.304 1.778,3.812 3.301,3.812 3.81,3.302 ; 3.81,-0.762 4.317,-1.268 5.842,-1.268 6.35,-0.76 6.35,3.304 6.858,3.812 8.381,3.812 8.89,3.302 ; 6.35,-0.762 6.857,-1.268 8.382,-1.268 8.89,-0.76 8.89,3.304
  text "1" at 0.508,-1.983 h1
  text "2" at 0.508,4.318 h1
  text "4" at 3.048,4.318 h1
  text "3" at 3.048,-2.412 h1
  text "6" at 5.588,4.318 h1
  text "5" at 5.588,-2.412 h1
  text "8" at 8.128,4.318 h1
  text "7" at 8.128,-2.412 h1
3D body "PIN.STEP": height 8.43, standoff -2.49, extent -1.27,-1.27 1.27,1.27
3D body "PIN_mid.STEP": height 8.43, standoff -2.49, extent 3.81,1.27 6.35,3.81
3D body "PIN_mid.STEP": height 8.43, standoff -2.49, extent 1.27,1.27 3.81,3.81
3D body "PIN_mid.STEP": height 8.43, standoff -2.49, extent 1.27,-1.27 3.81,1.27
3D body "PIN_mid.STEP": height 8.43, standoff -2.49, extent 3.81,-1.27 6.35,1.27
3D body "PIN.STEP": height 8.43, standoff -2.49, extent -1.27,1.27 1.27,3.81
3D body "PIN.STEP": height 8.43, standoff -2.49, extent 6.35,1.27 8.89,3.81
3D body "PIN.STEP": height 8.43, standoff -2.49, extent 6.35,-1.27 8.89,1.27

## MHDR2X04-254P - E [mm] "Male Header 2X04 with 2.54 mm Pitch"
pads (8):
  rect 1.5x1.5 hole 0.9: 1(0,0)
  round 1.5 hole 0.9: 2(0,2.54) 3(2.54,0) 4(2.54,2.54) 5(5.08,0) 6(5.08,2.54) 7(7.62,0) 8(7.62,2.54)
Top Overlay:
  lines w0.254: 1.27,-0.762 1.777,-1.268 3.302,-1.268 3.81,-0.76 3.81,3.304 4.318,3.812 5.841,3.812 6.35,3.302 ; 1.27,3.302 0.761,3.812 -0.762,3.812 -1.27,3.304 -1.27,-0.762 -0.763,-1.268 0.762,-1.268 1.27,-0.76 1.27,3.304 1.778,3.812 3.301,3.812 3.81,3.302 ; 3.81,-0.762 4.317,-1.268 5.842,-1.268 6.35,-0.76 6.35,3.304 6.858,3.812 8.381,3.812 8.89,3.302 ; 6.35,-0.762 6.857,-1.268 8.382,-1.268 8.89,-0.76 8.89,3.304
3D body "PIN.STEP": height 8.43, standoff -2.49, extent 6.35,-1.27 8.89,1.27
3D body "PIN.STEP": height 8.43, standoff -2.49, extent 6.35,1.27 8.89,3.81
3D body "PIN.STEP": height 8.43, standoff -2.49, extent -1.27,1.27 1.27,3.81
3D body "PIN_mid.STEP": height 8.43, standoff -2.49, extent 3.81,-1.27 6.35,1.27
3D body "PIN_mid.STEP": height 8.43, standoff -2.49, extent 1.27,-1.27 3.81,1.27
3D body "PIN_mid.STEP": height 8.43, standoff -2.49, extent 1.27,1.27 3.81,3.81
3D body "PIN_mid.STEP": height 8.43, standoff -2.49, extent 3.81,1.27 6.35,3.81
3D body "PIN.STEP": height 8.43, standoff -2.49, extent -1.27,-1.27 1.27,1.27

## MHDR2X05-254P [mm] "Male Header 2X05 with 2.54 mm Pitch"
pads (10):
  rect 1.5x1.5 hole 0.9: 1(0,0)
  round 1.5 hole 0.9: 2(0,2.54) 3(2.54,0) 4(2.54,2.54) 5(5.08,0) 6(5.08,2.54) 7(7.62,0) 8(7.62,2.54) 9(10.16,0) 10(10.16,2.54)
Top Overlay:
  lines w0.254: 1.27,-0.762 1.777,-1.268 3.302,-1.268 3.81,-0.76 3.81,3.304 4.318,3.812 5.841,3.812 6.35,3.302 ; 1.27,3.302 0.761,3.812 -0.762,3.812 -1.27,3.304 -1.27,-0.762 -0.763,-1.268 0.762,-1.268 1.27,-0.76 1.27,3.304 1.778,3.812 3.301,3.812 3.81,3.302 ; 3.81,-0.762 4.317,-1.268 5.842,-1.268 6.35,-0.76 6.35,3.304 6.858,3.812 8.381,3.812 8.89,3.302 ; 6.35,-0.762 6.857,-1.268 8.382,-1.268 8.89,-0.76 8.89,3.304 9.398,3.812 10.921,3.812 11.43,3.302 ; 8.89,-0.762 9.397,-1.268 10.922,-1.268 11.43,-0.76 11.43,3.304
  text "2" at 0.508,4.318 h1
  text "1" at 0.508,-1.983 h1
  text "4" at 3.048,4.318 h1
  text "3" at 3.048,-2.412 h1
  text "6" at 5.588,4.318 h1
  text "5" at 5.588,-2.412 h1
  text "8" at 8.128,4.318 h1
  text "7" at 8.128,-2.412 h1
  text "10" at 10.668,4.318 h1
  text "9" at 10.668,-2.364 h1
3D body "PIN.STEP": height 8.43, standoff -2.49, extent 8.89,-1.27 11.43,1.27
3D body "PIN.STEP": height 8.43, standoff -2.49, extent 8.89,1.27 11.43,3.81
3D body "PIN.STEP": height 8.43, standoff -2.49, extent -1.27,1.27 1.27,3.81
3D body "PIN_mid.STEP": height 8.43, standoff -2.49, extent 6.35,-1.27 8.89,1.27
3D body "PIN_mid.STEP": height 8.43, standoff -2.49, extent 3.81,-1.27 6.35,1.27
3D body "PIN_mid.STEP": height 8.43, standoff -2.49, extent 1.27,-1.27 3.81,1.27
3D body "PIN_mid.STEP": height 8.43, standoff -2.49, extent 1.27,1.27 3.81,3.81
3D body "PIN_mid.STEP": height 8.43, standoff -2.49, extent 6.35,1.27 8.89,3.81
3D body "PIN_mid.STEP": height 8.43, standoff -2.49, extent 3.81,1.27 6.35,3.81
3D body "PIN.STEP": height 8.43, standoff -2.49, extent -1.27,-1.27 1.27,1.27

## MHDR2X05-254P - E [mm] "Male Header 2X05 with 2.54 mm Pitch"
pads (10):
  rect 1.5x1.5 hole 0.9: 1(0,0)
  round 1.5 hole 0.9: 2(0,2.54) 3(2.54,0) 4(2.54,2.54) 5(5.08,0) 6(5.08,2.54) 7(7.62,0) 8(7.62,2.54) 9(10.16,0) 10(10.16,2.54)
Top Overlay:
  lines w0.254: 1.27,-0.762 1.777,-1.268 3.302,-1.268 3.81,-0.76 3.81,3.304 4.318,3.812 5.841,3.812 6.35,3.302 ; 1.27,3.302 0.761,3.812 -0.762,3.812 -1.27,3.304 -1.27,-0.762 -0.763,-1.268 0.762,-1.268 1.27,-0.76 1.27,3.304 1.778,3.812 3.301,3.812 3.81,3.302 ; 3.81,-0.762 4.317,-1.268 5.842,-1.268 6.35,-0.76 6.35,3.304 6.858,3.812 8.381,3.812 8.89,3.302 ; 6.35,-0.762 6.857,-1.268 8.382,-1.268 8.89,-0.76 8.89,3.304 9.398,3.812 10.921,3.812 11.43,3.302 ; 8.89,-0.762 9.397,-1.268 10.922,-1.268 11.43,-0.76 11.43,3.304
3D body "PIN.STEP": height 8.43, standoff -2.49, extent -1.27,-1.27 1.27,1.27
3D body "PIN_mid.STEP": height 8.43, standoff -2.49, extent 3.81,1.27 6.35,3.81
3D body "PIN_mid.STEP": height 8.43, standoff -2.49, extent 6.35,1.27 8.89,3.81
3D body "PIN_mid.STEP": height 8.43, standoff -2.49, extent 1.27,1.27 3.81,3.81
3D body "PIN_mid.STEP": height 8.43, standoff -2.49, extent 1.27,-1.27 3.81,1.27
3D body "PIN_mid.STEP": height 8.43, standoff -2.49, extent 3.81,-1.27 6.35,1.27
3D body "PIN_mid.STEP": height 8.43, standoff -2.49, extent 6.35,-1.27 8.89,1.27
3D body "PIN.STEP": height 8.43, standoff -2.49, extent -1.27,1.27 1.27,3.81
3D body "PIN.STEP": height 8.43, standoff -2.49, extent 8.89,1.27 11.43,3.81
3D body "PIN.STEP": height 8.43, standoff -2.49, extent 8.89,-1.27 11.43,1.27

## MHDR2X06-254P [mm] "Male Header 2X06 with 2.54 mm Pitch"
pads (12):
  rect 1.5x1.5 hole 0.9: 1(0,0)
  round 1.5 hole 0.9: 2(0,2.54) 3(2.54,0) 4(2.54,2.54) 5(5.08,0) 6(5.08,2.54) 7(7.62,0) 8(7.62,2.54) 9(10.16,0) 10(10.16,2.54) 11(12.7,0) 12(12.7,2.54)
Top Overlay:
  lines w0.254: 1.27,-0.762 1.777,-1.268 3.302,-1.268 3.81,-0.76 3.81,3.304 4.318,3.812 5.841,3.812 6.35,3.302 ; 1.27,3.302 0.761,3.812 -0.762,3.812 -1.27,3.304 -1.27,-0.762 -0.763,-1.268 0.762,-1.268 1.27,-0.76 1.27,3.304 1.778,3.812 3.301,3.812 3.81,3.302 ; 3.81,-0.762 4.317,-1.268 5.842,-1.268 6.35,-0.76 6.35,3.304 6.858,3.812 8.381,3.812 8.89,3.302 ; 6.35,-0.762 6.857,-1.268 8.382,-1.268 8.89,-0.76 8.89,3.304 9.398,3.812 10.921,3.812 11.43,3.302 ; 8.89,-0.762 9.397,-1.268 10.922,-1.268 11.43,-0.76 11.43,3.304 11.938,3.812 13.461,3.812 13.97,3.302 ; 11.43,-0.762 11.937,-1.268 13.462,-1.268 13.97,-0.76 13.97,3.304
  text "1" at 0.508,-1.983 h1
  text "2" at 0.508,4.318 h1
  text "2" at 0.508,4.318 h1
  text "1" at 0.508,-1.983 h1
  text "4" at 3.048,4.318 h1
  text "3" at 3.048,-2.412 h1
  text "6" at 5.588,4.318 h1
  text "5" at 5.588,-2.412 h1
  text "8" at 8.128,4.318 h1
  text "7" at 8.128,-2.412 h1
  text "10" at 10.668,4.318 h1
  text "9" at 10.668,-2.364 h1
  text "12" at 13.208,4.318 h1
  text "11" at 13.208,-2.716 h1
3D body "PIN.STEP": height 8.43, standoff -2.49, extent -1.27,-1.27 1.27,1.27
3D body "PIN_mid.STEP": height 8.43, standoff -2.49, extent 3.81,1.27 6.35,3.81
3D body "PIN_mid.STEP": height 8.43, standoff -2.49, extent 6.35,1.27 8.89,3.81
3D body "PIN_mid.STEP": height 8.43, standoff -2.49, extent 8.89,1.27 11.43,3.81
3D body "PIN_mid.STEP": height 8.43, standoff -2.49, extent 1.27,1.27 3.81,3.81
3D body "PIN_mid.STEP": height 8.43, standoff -2.49, extent 1.27,-1.27 3.81,1.27
3D body "PIN_mid.STEP": height 8.43, standoff -2.49, extent 3.81,-1.27 6.35,1.27
3D body "PIN_mid.STEP": height 8.43, standoff -2.49, extent 6.35,-1.27 8.89,1.27
3D body "PIN_mid.STEP": height 8.43, standoff -2.49, extent 8.89,-1.27 11.43,1.27
3D body "PIN.STEP": height 8.43, standoff -2.49, extent -1.27,1.27 1.27,3.81
3D body "PIN.STEP": height 8.43, standoff -2.49, extent 11.43,1.27 13.97,3.81
3D body "PIN.STEP": height 8.43, standoff -2.49, extent 11.43,-1.27 13.97,1.27

## MHDR2X06-254P - E [mm] "Male Header 2X06 with 2.54 mm Pitch"
pads (12):
  rect 1.5x1.5 hole 0.9: 1(0,0)
  round 1.5 hole 0.9: 2(0,2.54) 3(2.54,0) 4(2.54,2.54) 5(5.08,0) 6(5.08,2.54) 7(7.62,0) 8(7.62,2.54) 9(10.16,0) 10(10.16,2.54) 11(12.7,0) 12(12.7,2.54)
Top Overlay:
  lines w0.254: 1.27,-0.762 1.777,-1.268 3.302,-1.268 3.81,-0.76 3.81,3.304 4.318,3.812 5.841,3.812 6.35,3.302 ; 1.27,3.302 0.761,3.812 -0.762,3.812 -1.27,3.304 -1.27,-0.762 -0.763,-1.268 0.762,-1.268 1.27,-0.76 1.27,3.304 1.778,3.812 3.301,3.812 3.81,3.302 ; 3.81,-0.762 4.317,-1.268 5.842,-1.268 6.35,-0.76 6.35,3.304 6.858,3.812 8.381,3.812 8.89,3.302 ; 6.35,-0.762 6.857,-1.268 8.382,-1.268 8.89,-0.76 8.89,3.304 9.398,3.812 10.921,3.812 11.43,3.302 ; 8.89,-0.762 9.397,-1.268 10.922,-1.268 11.43,-0.76 11.43,3.304 11.938,3.812 13.461,3.812 13.97,3.302 ; 11.43,-0.762 11.937,-1.268 13.462,-1.268 13.97,-0.76 13.97,3.304
3D body "PIN.STEP": height 8.43, standoff -2.49, extent 11.43,-1.27 13.97,1.27
3D body "PIN.STEP": height 8.43, standoff -2.49, extent 11.43,1.27 13.97,3.81
3D body "PIN.STEP": height 8.43, standoff -2.49, extent -1.27,1.27 1.27,3.81
3D body "PIN_mid.STEP": height 8.43, standoff -2.49, extent 8.89,-1.27 11.43,1.27
3D body "PIN_mid.STEP": height 8.43, standoff -2.49, extent 6.35,-1.27 8.89,1.27
3D body "PIN_mid.STEP": height 8.43, standoff -2.49, extent 3.81,-1.27 6.35,1.27
3D body "PIN_mid.STEP": height 8.43, standoff -2.49, extent 1.27,-1.27 3.81,1.27
3D body "PIN_mid.STEP": height 8.43, standoff -2.49, extent 1.27,1.27 3.81,3.81
3D body "PIN_mid.STEP": height 8.43, standoff -2.49, extent 8.89,1.27 11.43,3.81
3D body "PIN_mid.STEP": height 8.43, standoff -2.49, extent 6.35,1.27 8.89,3.81
3D body "PIN_mid.STEP": height 8.43, standoff -2.49, extent 3.81,1.27 6.35,3.81
3D body "PIN.STEP": height 8.43, standoff -2.49, extent -1.27,-1.27 1.27,1.27